# Altium footprint library sEMG.PcbLib: 71 footprints (part 1 of 5)
Each footprint in its own frame and in the unit in brackets; x right, y up, seen from the top. Pads: shape width x height; smd on the part's side, far side on the other; paste and mask are expansions set on the pad; w line width, h text height; cw(c..) or ccw(c..) is an arc to the next point about the centre after c.
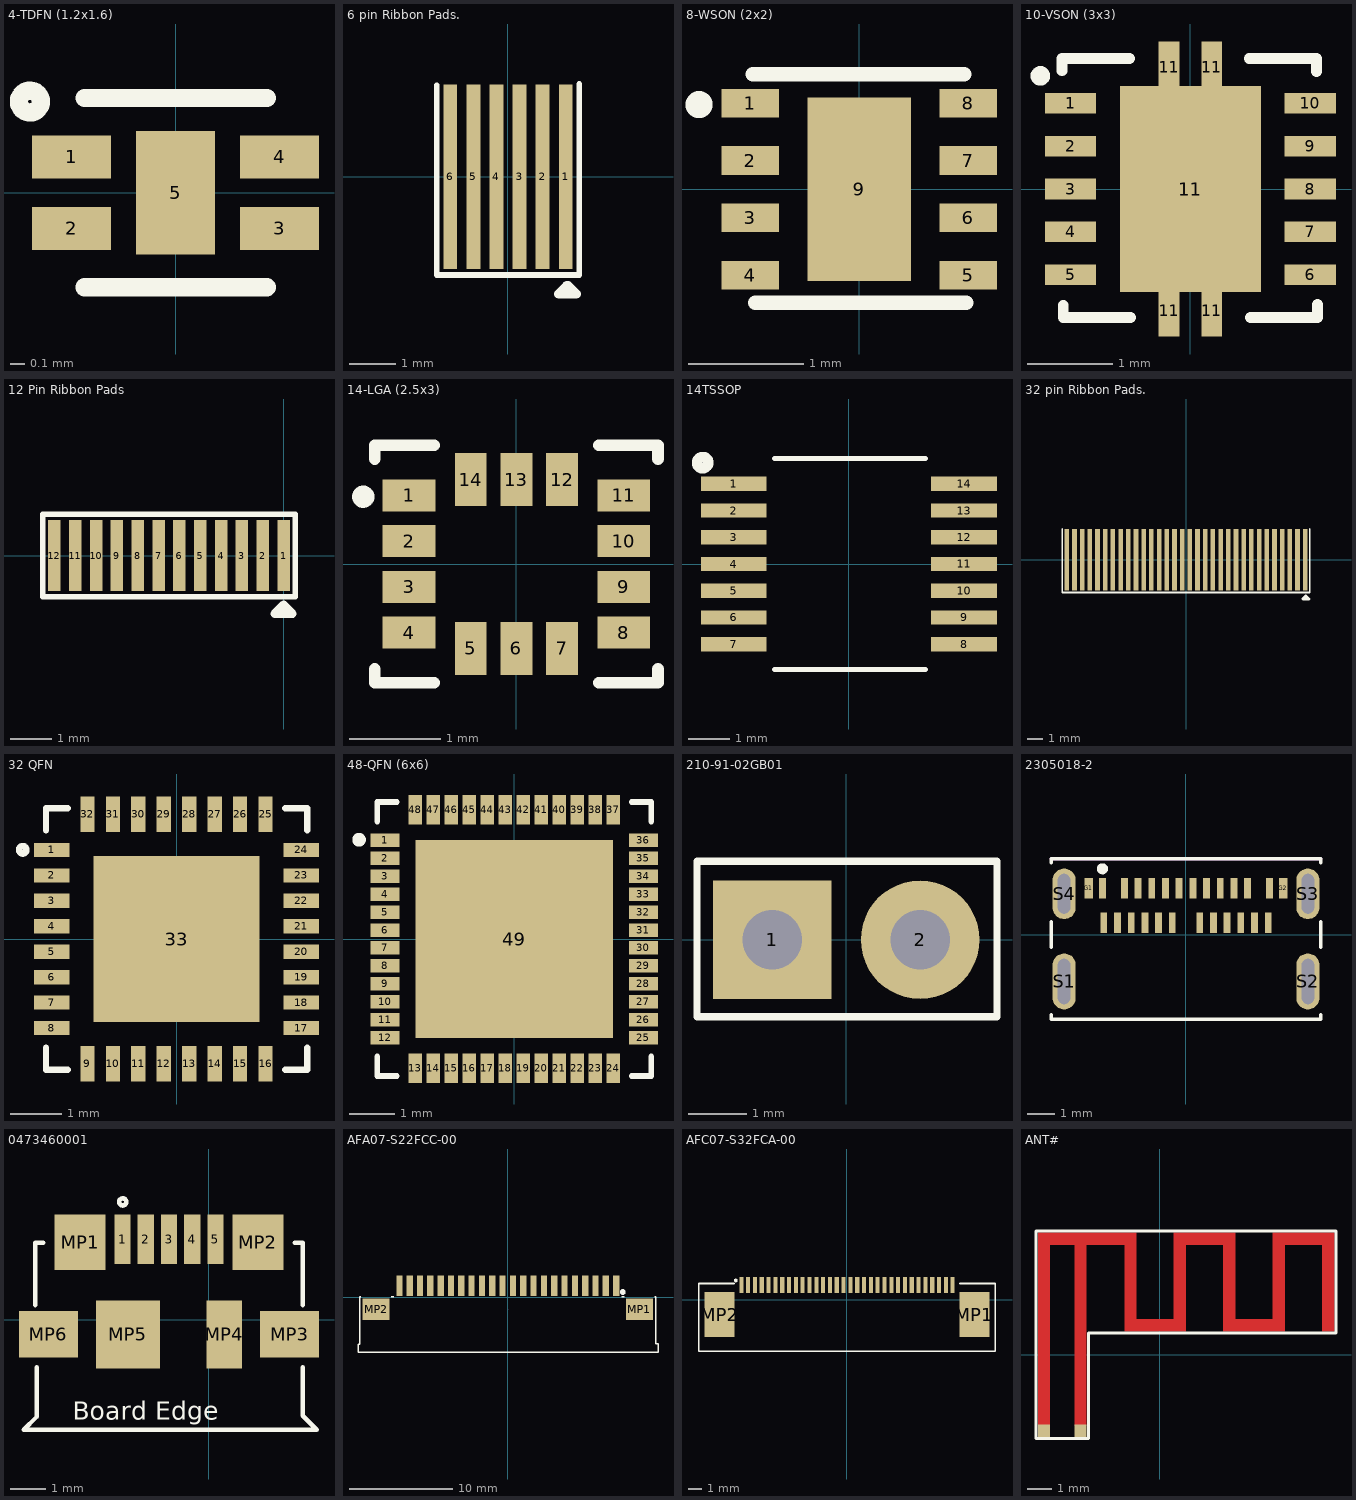
[diagram p0: the footprints below, top view; thin cyan lines are the x and y axes]

## 4-TDFN (1.2x1.6) [mm]
pads (5):
  rect 0.55x0.3 smd: 1(-0.725,0.25) 2(-0.725,-0.25) 3(0.725,-0.25) 4(0.725,0.25)
  rect 0.55x0.86 smd: 5(0,0)
Top Overlay:
  circle w0.127: c-1.016,0.635 r0.076
  lines w0.127: -0.635,-0.66 0.635,-0.66 ; -0.635,0.66 0.635,0.66
3D body "SIP32432DNP3-T1GE4--3DModel-STEP-56544.STEP": height 0.6, standoff 0, extent -0.8,-0.6 0.8,0.6

## 6 pin Ribbon Pads. [mm]
pads (6):
  rect 0.3x4 smd: 1(1.25,0) 2(0.75,0) 3(0.25,0) 4(-0.25,0) 5(-0.75,0) 6(-1.25,0)
Top Overlay:
  lines w0.127: -1.544,1.981 -1.544,-2.134 1.544,-2.134 1.544,2.007
  lines w0.2: 1.275,-2.362 1.098,-2.54 1.479,-2.54 1.301,-2.362

## 8-WSON (2x2) [mm] "IC REG BUCK 3.3V 1A 8WSON"
pads (9):
  rect 0.5x0.25 smd: 1(-0.95,0.75) 2(-0.95,0.25) 3(-0.95,-0.25) 4(-0.95,-0.75) 5(0.95,-0.75) 6(0.95,-0.25) 7(0.95,0.25) 8(0.95,0.75)
  rect 0.9x1.6 smd: 9(0,0)
Top Overlay:
  circle w0.2: c-1.397,0.737 r0.018
  lines w0.127: -0.927,1.003 0.914,1.003 ; -0.908,-0.991 0.933,-0.991
3D body "TPS62162DSGR.STEP": height 0.8, standoff 0, extent -1,-1 1,1

## 10-VSON (3x3) [mm]
pads (15):
  rect 0.6x0.24 smd: 1(-1.4,1) 2(-1.4,0.5) 3(-1.4,0) 4(-1.4,-0.5) 5(-1.4,-1) 6(1.4,-1) 7(1.4,-0.5) 8(1.4,0) 9(1.4,0.5) 10(1.4,1)
  rect 0.24x0.6 smd: 11(-0.25,-1.423) 11(-0.25,1.423) 11(0.25,-1.423) 11(0.25,1.423)
  rect 1.65x2.4 smd: 11(0,0)
Top Overlay:
  circle w0.127: c-1.753,1.321 r0.051
  lines w0.127: -1.499,1.381 -1.499,1.523 -0.713,1.523 ; -1.486,-1.357 -1.486,-1.499 -0.7,-1.499 ; 0.687,1.523 1.473,1.523 1.473,1.372 ; 0.7,-1.499 1.486,-1.499 1.486,-1.348
3D body "TPS61230DRCR.STEP": height 1, standoff 0, extent -1.5,-1.5 1.5,1.5

## 12 Pin Ribbon Pads [mm]
pads (12):
  rect 0.3x1.7 smd: 1(0,0) 2(-0.5,0) 3(-1,0) 4(-1.5,0) 5(-2,0) 6(-2.5,0) 7(-3,0) 8(-3.5,0) 9(-4,0) 10(-4.5,0) 11(-5,0) 12(-5.5,0)
Top Overlay:
  lines w0.127: -5.779,-0.991 0.279,-0.991 0.279,0.991 -5.779,0.991 -5.779,-0.991
  lines w0.2: -0.216,-1.397 0,-1.181 0.216,-1.397 -0.216,-1.397

## 14-LGA (2.5x3) [mm]
pads (14):
  rect 0.58x0.35 smd: 1(-1.175,0.75) 2(-1.175,0.25) 3(-1.175,-0.25) 4(-1.175,-0.75) 8(1.175,-0.75) 9(1.175,-0.25) 10(1.175,0.25) 11(1.175,0.75)
  rect 0.35x0.58 smd: 5(-0.5,-0.925) 6(0,-0.925) 7(0.5,-0.925) 12(0.5,0.925) 13(0,0.925) 14(-0.5,0.925)
Top Overlay:
  circle w0.127: c-1.676,0.737 r0.058
  lines w0.127: -1.55,-1.15 -1.55,-1.3 -0.9,-1.3 ; -1.55,1.15 -1.55,1.3 -0.9,1.3 ; 0.9,-1.3 1.55,-1.3 1.55,-1.15 ; 0.9,1.3 1.55,1.3 1.55,1.15
3D body "LSM6DS3TR--3DModel-STEP-56544.STEP": height 0.87, standoff 0.01, extent -1.5,-1.25 1.5,1.25

## 14TSSOP [mm]
pads (14):
  rect 1.6x0.35 smd: 1(-2.8,1.95) 2(-2.8,1.3) 3(-2.8,0.65) 4(-2.8,0) 5(-2.8,-0.65) 6(-2.8,-1.3) 7(-2.8,-1.95) 8(2.8,-1.95) 9(2.8,-1.3) 10(2.8,-0.65) 11(2.8,0) 12(2.8,0.65) 13(2.8,1.3) 14(2.8,1.95)
Top Overlay:
  circle w0.254: c-3.556,2.464 r0.137
  lines w0.127: -1.803,-2.565 1.854,-2.565 ; -1.803,2.565 1.854,2.565
3D body "TL084CPWR.STEP": height 1.2, standoff 0, extent -3.2,-2.5 3.2,2.5

## 32 pin Ribbon Pads. [mm]
pads (32):
  rect 0.3x4 smd: 1(7.75,0) 2(7.25,0) 3(6.75,0) 4(6.25,0) 5(5.75,0) 6(5.25,0) 7(4.75,0) 8(4.25,0) 9(3.75,0) 10(3.25,0) 11(2.75,0) 12(2.25,0) 13(1.75,0) 14(1.25,0) 15(0.75,0) 16(0.25,0) 17(-0.25,0) 18(-0.75,0) 19(-1.25,0) 20(-1.75,0) 21(-2.25,0) 22(-2.75,0) 23(-3.25,0) 24(-3.75,0) 25(-4.25,0) 26(-4.75,0) 27(-5.25,0) 28(-5.75,0) 29(-6.25,0) 30(-6.75,0) 31(-7.25,0) 32(-7.75,0)
Top Overlay:
  lines w0.127: -8.044,2.007 -8.044,-2.134 8.044,-2.134 ; 4.956,-2.134 8.044,-2.134 ; 8.044,2.007 8.044,-2.134
  lines w0.2: 7.775,-2.362 7.598,-2.54 7.979,-2.54 7.801,-2.362

## 32 QFN [mm] "32pins, 5x5mm body, 0.5mm pitch QFN package"
pads (33):
  rect 0.7x0.28 smd: 1(-2.45,1.75) 2(-2.45,1.25) 3(-2.45,0.75) 4(-2.45,0.25) 5(-2.45,-0.25) 6(-2.45,-0.75) 7(-2.45,-1.25) 8(-2.45,-1.75) 17(2.45,-1.75) 18(2.45,-1.25) 19(2.45,-0.75) 20(2.45,-0.25) 21(2.45,0.25) 22(2.45,0.75) 23(2.45,1.25) 24(2.45,1.75)
  rect 0.28x0.7 smd: 9(-1.75,-2.45) 10(-1.25,-2.45) 11(-0.75,-2.45) 12(-0.25,-2.45) 13(0.25,-2.45) 14(0.75,-2.45) 15(1.25,-2.45) 16(1.75,-2.45) 25(1.75,2.45) 26(1.25,2.45) 27(0.75,2.45) 28(0.25,2.45) 29(-0.25,2.45) 30(-0.75,2.45) 31(-1.25,2.45) 32(-1.75,2.45)
  rect 3.254x3.254 smd: 33(0,0)
Top Layer:
  rectangle: -0.635,-0.635 0.635,0.635
Top Overlay:
  circle w0.127: c-3.023,1.753 r0.073
  lines w0.127: -2.565,-2.134 -2.565,-2.565 -2.134,-2.565 ; -2.565,2.134 -2.565,2.565 -2.134,2.565 ; 2.134,-2.565 2.565,-2.565 2.565,-2.134 ; 2.134,2.565 2.565,2.565 2.565,2.134
3D body "User Library-QFN-32-5x5 - EQ.STEP": height 0.85, standoff 0, extent -2.5,-2.5 2.5,2.5

## 48-QFN (6x6) [mm]
pads (49):
  rect 0.65x0.3 smd: 1(-2.875,2.2) 2(-2.875,1.8) 3(-2.875,1.4) 4(-2.875,1) 5(-2.875,0.6) 6(-2.875,0.2) 7(-2.875,-0.2) 8(-2.875,-0.6) 9(-2.875,-1) 10(-2.875,-1.4) 11(-2.875,-1.8) 12(-2.875,-2.2) 25(2.875,-2.2) 26(2.875,-1.8) 27(2.875,-1.4) 28(2.875,-1) 29(2.875,-0.6) 30(2.875,-0.2) 31(2.875,0.2) 32(2.875,0.6) 33(2.875,1) 34(2.875,1.4) 35(2.875,1.8) 36(2.875,2.2)
  rect 0.3x0.65 smd: 13(-2.2,-2.875) 14(-1.8,-2.875) 15(-1.4,-2.875) 16(-1,-2.875) 17(-0.6,-2.875) 18(-0.2,-2.875) 19(0.2,-2.875) 20(0.6,-2.875) 21(1,-2.875) 22(1.4,-2.875) 23(1.8,-2.875) 24(2.2,-2.875) 37(2.2,2.875) 38(1.8,2.875) 39(1.4,2.875) 40(1,2.875) 41(0.6,2.875) 42(0.2,2.875) 43(-0.2,2.875) 44(-0.6,2.875) 45(-1,2.875) 46(-1.4,2.875) 47(-1.8,2.875) 48(-2.2,2.875)
  rect 4.4x4.4 smd: 49(0,0)
Top Overlay:
  circle w0.254: c-3.454,2.21 r0.023
  lines w0.127: -3.048,-2.616 -3.048,-3.048 -2.616,-3.048 ; -3.048,2.616 -3.048,3.048 -2.616,3.048 ; 2.616,-3.048 3.048,-3.048 3.048,-2.616 ; 2.616,3.048 3.048,3.048 3.048,2.616
3D body "QFN-48.stp": height 0.86, standoff -0.03, extent -2.997,-2.997 2.997,2.997

## 210-91-02GB01 [mm]
pads (2):
  rect 2.04x2.04 hole 1.02: 1(-1.27,0)
  round 2.04 hole 1.02: 2(1.27,0)
Top Overlay:
  lines w0.127: -2.565,-1.321 -2.565,1.346 2.591,1.346 2.591,-1.321 -2.565,-1.321
3D body "61300211121_Download_STP_61300211121_rev1.stp": height 8.57, standoff -2.97, extent -2.54,-1.27 2.54,1.27

## 2305018-2 [mm]
pads (30):
  rect 0.25x0.75 smd: A1(-3.05,1.7) A2(-2.25,1.7) A3(-1.75,1.7) A4(-1.25,1.7) A5(-0.75,1.7) A6(-0.25,1.7) A7(0.25,1.7) A8(0.75,1.7) A9(1.25,1.7) A10(1.75,1.7) A11(2.25,1.7) A12(3.05,1.7) B1(3,0.45) B2(2.5,0.45) B3(2,0.45) B4(1.5,0.45) B5(1,0.45) B6(0.5,0.45) B7(-0.5,0.45) B8(-1,0.45) B9(-1.5,0.45) B10(-2,0.45) B11(-2.5,0.45) B12(-3,0.45)
  rect 0.3x0.75 smd: G1(-3.55,1.7) G2(3.55,1.7)
  oval 0.85x2.05 hole 0.45 slot 1.65 at 90 deg: S1(-4.45,-1.7) S2(4.45,-1.7)
  oval 0.85x1.85 hole 0.45 slot 1.45 at 90 deg: S3(4.45,1.5) S4(-4.45,1.5)
Top Overlay:
  circle w0.2: c-3.05,2.413 r0.1
  lines w0.127: -4.925,-2.906 -4.925,-3.075 4.925,-3.075 4.925,-2.906 ; -4.925,-0.444 -4.925,0.48 ; -4.925,2.634 -4.925,2.775 4.925,2.775 4.925,2.634 ; 4.925,-0.444 4.925,0.48
Mechanical 13:
  lines w0.127: -4.925,2.775 4.925,2.775
3D body "2305018-2--3DModel-STEP-56544.STEP": height 3.53, standoff -0.53, extent -4.919,-5.856 4.919,2.794

## 0473460001 [mm]
pads (11):
  rect 0.45x1.38 smd: 1(-2.418,2.254) 2(-1.768,2.254) 3(-1.118,2.254) 4(-0.468,2.254) 5(0.182,2.254)
  rect 1.425x1.55 smd: MP1(-3.605,2.169) MP2(1.37,2.169)
  rect 1.65x1.3 smd: MP3(2.257,-0.406) MP6(-4.493,-0.406)
  rect 1x1.9 smd: MP4(0.432,-0.406)
  rect 1.8x1.9 smd: MP5(-2.268,-0.406)
Top Overlay:
  circle w0.127: c-2.413,3.302 r0.1
  lines w0.127: -4.868,0.416 -4.868,2.134 ; -4.868,2.164 -4.638,2.164 ; -4.826,-1.327 -4.826,-2.327 -4.826,-2.718 -5.182,-3.073 3.023,-3.073 2.631,-2.682 2.631,-1.327 ; 2.402,2.164 2.632,2.164 ; 2.632,0.416 2.632,2.134
  text "Board Edge" at -3.81,-2.803 h0.51
3D body "step_temp.STEP": height 2.7, standoff -0.25, extent -5.298,-3.336 3.062,2.094

## AFA07-S22FCC-00 [mm]
pads (24):
  rect 0.6x2 smd: 1(10.499,1.102) 2(9.5,1.102) 3(8.5,1.102) 4(7.5,1.102) 5(6.5,1.102) 6(5.501,1.101) 7(4.499,1.102) 8(3.499,1.102) 9(2.499,1.102) 10(1.499,1.102) 11(0.499,1.102) 12(-0.501,1.102) 13(-1.5,1.103) 14(-2.499,1.103) 15(-3.499,1.101) 16(-4.499,1.103) 17(-5.499,1.103) 18(-6.499,1.103) 19(-7.499,1.103) 20(-8.499,1.103) 21(-9.499,1.103) 22(-10.499,1.103)
  rect 2.6x2.1 smd: MP1(12.749,-1.148) MP2(-12.749,-1.147)
Top Overlay:
  circle w0.5: c11.151,0.508 r0.025
  lines w0.127: -14.219,0.071 -14.336,0.071 -14.336,-4.526 -14.506,-4.526 -14.506,-5.339 13.539,-5.339 ; -11.28,0.071 -11.026,0.071 ; 11.026,0.07 11.28,0.07 ; 13.549,-5.339 14.552,-5.339 14.552,-4.496 14.336,-4.496 14.336,0.07 14.219,0.07
Mechanical 15:
  lines w0.003: 0.045,-1.144 0.046,-1.144
3D body "F0504-H-22-20T.STEP": height 2, standoff -1.1, extent -8.151,-7.168 6.475,-1.868

## AFC07-S32FCA-00 [mm]
pads (34):
  rect 0.3x1.2 smd: 1(-7.75,1.085) 2(-7.25,1.085) 3(-6.75,1.085) 4(-6.25,1.085) 5(-5.75,1.085) 6(-5.25,1.085) 7(-4.75,1.085) 8(-4.25,1.085) 9(-3.75,1.085) 10(-3.25,1.085) 11(-2.75,1.085) 12(-2.25,1.085) 13(-1.75,1.085) 14(-1.25,1.085) 15(-0.75,1.085) 16(-0.25,1.085) 17(0.25,1.085) 18(0.75,1.085) 19(1.25,1.085) 20(1.75,1.085) 21(2.25,1.085) 22(2.75,1.085) 23(3.25,1.085) 24(3.75,1.085) 25(4.25,1.085) 26(4.75,1.085) 27(5.25,1.085) 28(5.75,1.085) 29(6.25,1.085) 30(6.75,1.085) 31(7.25,1.085) 32(7.75,1.085)
  rect 2.2x3.3 smd: MP1(9.35,-1.085) MP2(-9.35,-1.085)
Top Overlay:
  circle w0.127: c-8.153,1.422 r0.076
  lines w0.127: -10.879,-3.759 -10.879,1.192 -8.263,1.192 ; -10.871,-3.761 10.879,-3.761 10.879,1.192 8.263,1.192
3D body "AFC07-S32FCA-00.STEP": height 2.02, standoff 0, extent -10.805,-3.595 10.795,1.055

## ANT# [mm]
pads (2):
  rect 0.5x0.5 smd: ANT#(-3.2,-3.08) GND(-4.678,-3.079)
Top Layer:
  region: 5.072,4.941 4.572,4.941 4.572,0.941 5.072,0.941
  rectangle: 2.572,0.941 3.072,4.941
  region: 5.072,0.941 5.072,1.441 2.572,1.441 2.572,0.941
  region: 1.072,0.941 1.072,1.441 -1.428,1.441 -1.428,0.941
  rectangle: -1.428,0.941 -0.928,4.941
  region: 1.072,4.941 0.572,4.941 0.572,0.941 1.072,0.941
  rectangle: 6.572,0.941 7.072,4.941
  region: -4.928,4.941 -4.928,4.441 -0.928,4.441 -0.928,4.941
  region: 4.572,4.941 4.572,4.441 7.072,4.441 7.072,4.941
  region: 0.572,4.941 0.572,4.441 3.072,4.441 3.072,4.941
  rectangle: -4.928,-2.859 -4.428,4.941
  rectangle: -3.45,-2.86 -2.95,4.94
Top Overlay:
  lines w0.127: -2.88,-3.4 -5,-3.4 -5,5.01 7.14,5.01 7.14,0.87 -2.87,0.87 -2.87,-3.4